# Altium schematic symbol library Ethernet_Modbus_Dev_Board.SCHLIB: 50 symbols
Pins are listed as number, name and electrical type; pins without a type are passive.

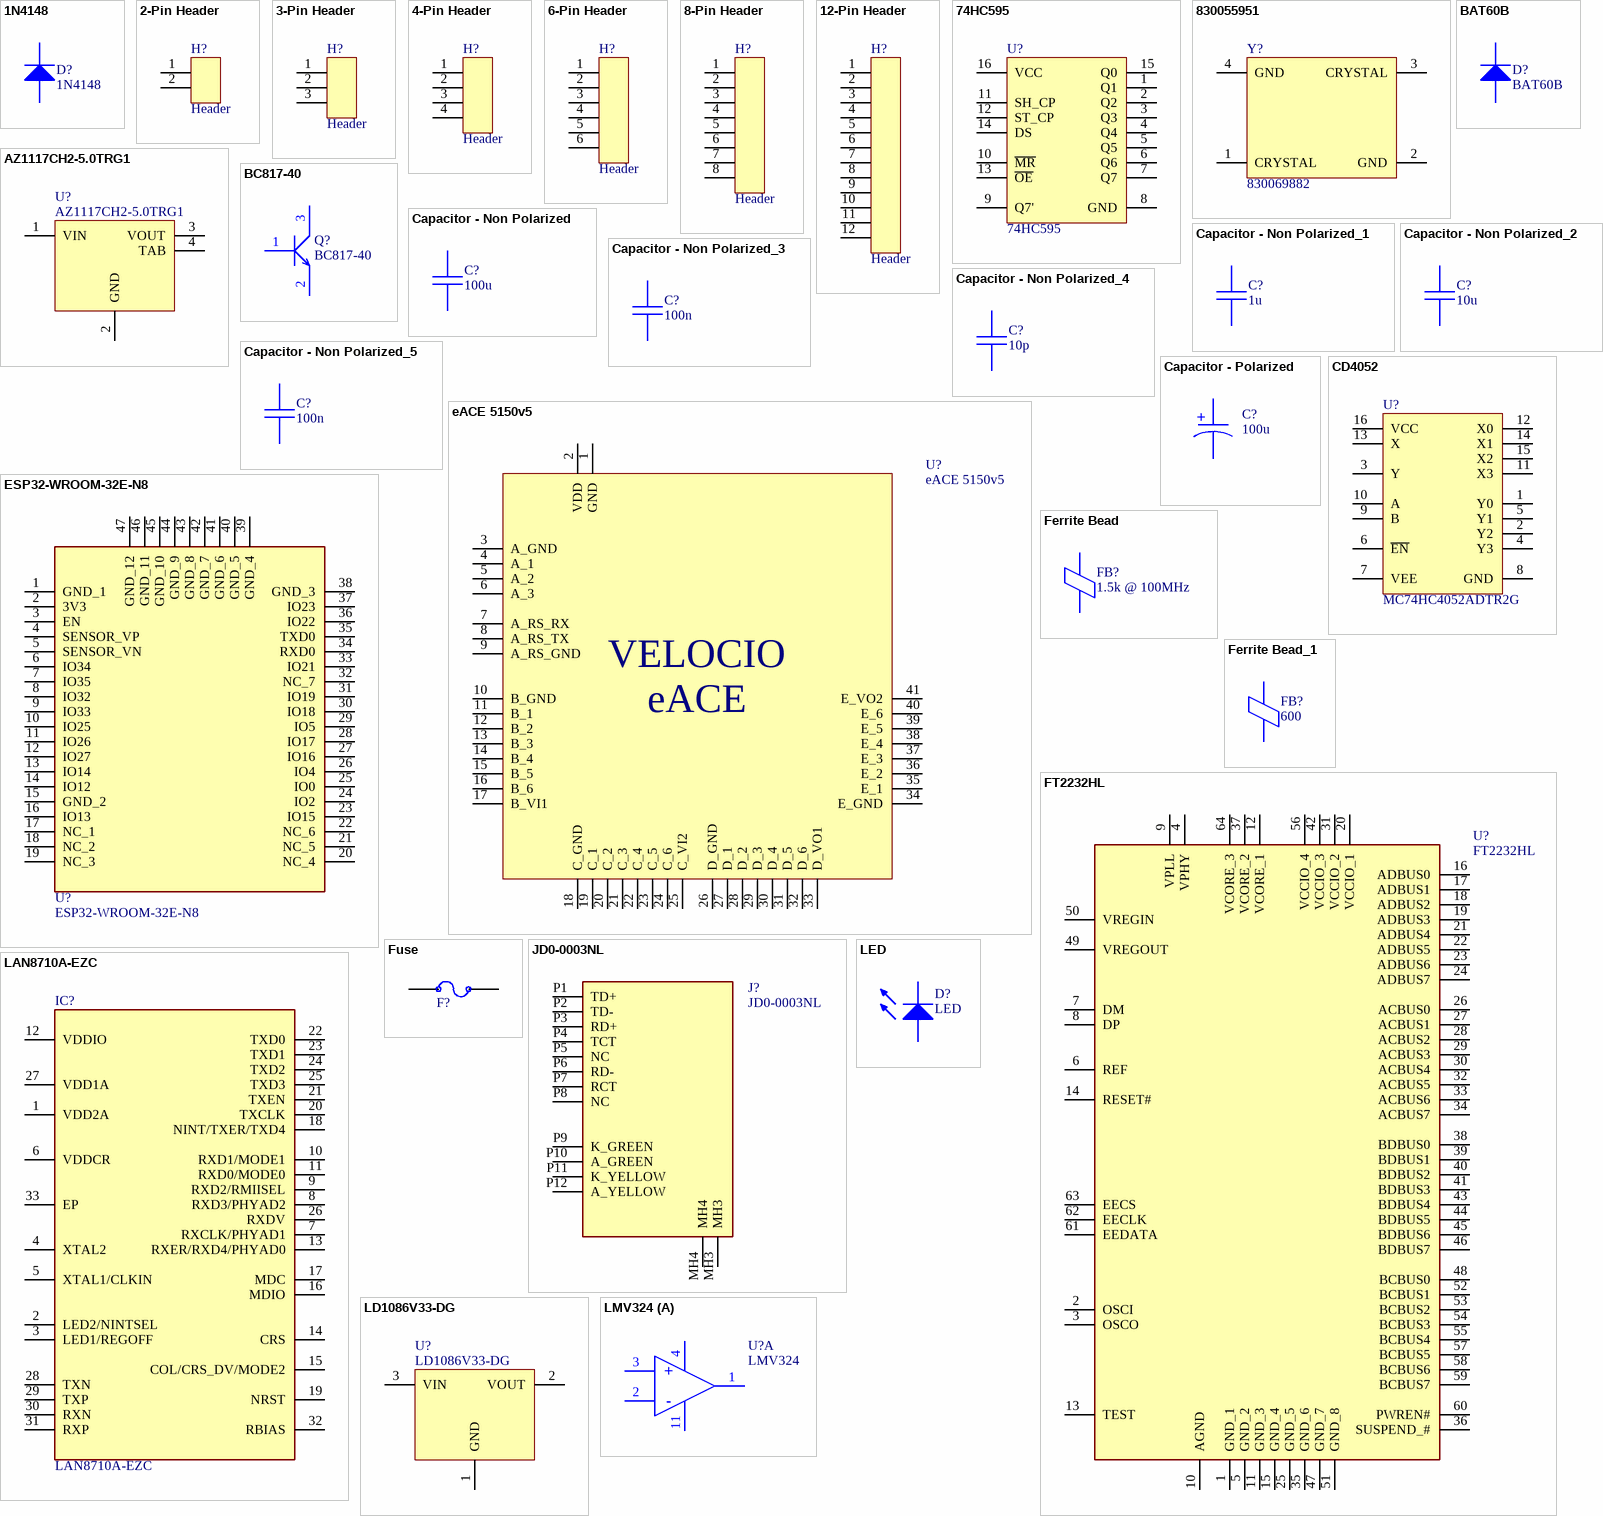
[diagram p0: symbols 1N4148 to LMV324]

## 1N4148
designator D?
1N4148 General Purpose Switching Diode; ComponentLink1Description: Datasheet; ComponentLink1URL: https://www.smc-diodes.com/propdf/1N4148W%20N0571%20REV.E.pdf
footprint SOD123
pins: 1 K, 2 A

## 2-Pin Header
designator H?, comment Header
2-Pin Header
footprint Header_1X2
pins: 1, 2

## 3-Pin Header
designator H?, comment Header
3-Pin Header
footprint Header_1X3
pins: 1, 2, 3

## 4-Pin Header
designator H?, comment Header
4-Pin Header
footprint Header_1X4
pins: 1, 2, 3, 4

## 6-Pin Header
designator H?, comment Header
6-Pin Header
footprint Header_1X6
pins: 1, 2, 3, 4, 5, 6

## 8-Pin Header
designator H?, comment Header
8-Pin Header
footprint Header_1X8
pins: 1, 2, 3, 4, 5, 6, 7, 8

## 12-Pin Header
designator H?, comment Header
12-Pin Header
footprint Header_1X12
pins: 1, 2, 3, 4, 5, 6, 7, 8, 9, 10, 11, 12

## 74HC595
designator U?
Shift Register
footprint TSSOP16
pins: 1 Q1, 2 Q2, 3 Q3, 4 Q4, 5 Q5, 6 Q6, 7 Q7, 8 GND, 9 Q7', 10 ~{MR}, 11 SH_CP, 12 ST_CP, 13 ~{OE}, 14 DS, 15 Q0, 16 VCC

## 830055951
designator Y?, comment 830069882
Crystal or Oscillator; Manufacturer_Name: Wurth Elektronik; Manufacturer_Part_Number: 830055951; Datasheet Link: https://www.mouser.co.uk/datasheet/2/445/830055951-2005581.pdf; Height: 0.8mm; Mouser Part Number: 710-830055951; Mouser Price/Stock: https://www.mouser.co.uk/ProductDetail/Wurth-Elektronik/830055951?qs=2WXlatMagcGarbRbipLZSg%3D%3D
footprint 830055951
pins: 1 CRYSTAL, 2 GND, 3 CRYSTAL, 4 GND

## AZ1117CH2-5.0TRG1
designator U?
5.0V Linear Voltage Regulator
footprint SOT223
pins: 1 VIN, 2 GND, 3 VOUT, 4 TAB

## BAT60B
designator D?
Schottky Diodes & Rectifiers 10 V 3000 mA; ComponentLink1Description: Datasheet; ComponentLink1URL: https://www.smc-diodes.com/propdf/1N4148W%20N0571%20REV.E.pdf
footprint SOD323
pins: 1 K, 2 A

## BC817-40
designator Q?
Transistor BJT NPN; Manufacturer_Name: Nexperia; Manufacturer_Part_Number: BC817-40,215; Datasheet Link: https://assets.nexperia.com/documents/data-sheet/BC817_SER.pdf; Height: 1.1mm; Mouser Part Number: 771-BC817-40-T/R; Mouser Price/Stock: https://www.mouser.co.uk/ProductDetail/Nexperia/BC817-40215?qs=me8TqzrmIYU%252B245p8hOLaQ%3D%3D; Arrow Part Number: BC817-40,215; Arrow Price/Stock: https://www.arrow.com/en/products/bc817-40215/nexperia?region=europe
footprint SOT23
pins: 1 B, 2 E, 3 C

## Capacitor - Non Polarized
designator C?, comment 100u
Non Polarized Capacitor
footprint CAPTH6.3x11
pins: 1, 2

## Capacitor - Non Polarized_1
designator C?, comment 1u
Non Polarized Capacitor
footprint CAP0603
pins: 1, 2

## Capacitor - Non Polarized_2
designator C?, comment 10u
Non Polarized Capacitor
footprint CAP0805 (Chip Capacitor, 2-Leads, Body 2.00x1.20mm, IPC Medium Density)
pins: 1, 2

## Capacitor - Non Polarized_3
designator C?, comment 100n
Non Polarized Capacitor
footprint CAP0603
pins: 1, 2

## Capacitor - Non Polarized_4
designator C?, comment 10p
Non Polarized Capacitor
footprint CAP0402
pins: 1, 2

## Capacitor - Non Polarized_5
designator C?, comment 100n
Non Polarized Capacitor
footprint CAP0603
pins: 1, 2

## Capacitor - Polarized
designator C?, comment 100u
Polarized Capacitor
footprint CAPTH6.3x11
pins: 1, 2
text: +

## CD4052
designator U?, comment MC74HC4052ADTR2G
Dual 4-Channel Analog Multiplexer/Demultiplexer; ComponentLink1Description: Datasheet; ComponentLink1URL: https://www.onsemi.com/pdf/datasheet/mc74hc4051a-d.pdf
footprint TSSOP16
pins: 1 Y0, 2 Y2, 3 Y, 4 Y3, 5 Y1, 6 ~{EN}, 7 VEE, 8 GND, 9 B, 10 A, 11 X3, 12 X0, 13 X, 14 X1, 15 X2, 16 VCC

## eACE 5150v5
designator U?
footprint eACEv5150
pins: 1 GND, 2 VDD, 3 A_GND, 4 A_1, 5 A_2, 6 A_3, 7 A_RS_RX, 8 A_RS_TX, 9 A_RS_GND, 10 B_GND, 11 B_1, 12 B_2, 13 B_3, 14 B_4, 15 B_5, 16 B_6, 17 B_VI1, 18 C_GND, 19 C_1, 20 C_2, 21 C_3, 22 C_4, 23 C_5, 24 C_6, 25 C_VI2, 26 D_GND, 27 D_1, 28 D_2, 29 D_3, 30 D_4, 31 D_5, 32 D_6, 33 D_VO1, 34 E_GND, 35 E_1, 36 E_2, 37 E_3, 38 E_4, 39 E_5, 40 E_6, 41 E_VO2
text: VELOCIO; eACE

## ESP32-WROOM-32E-N8
designator U?
Integrated Circuit; Manufacturer_Name: Espressif Systems; Datasheet Link: https://www.google.com/url?sa=t&rct=j&q=&esrc=s&source=web&cd=&ved=2ahUKEwjLw4ysybv2AhXFzIUKHZUbB64QFnoECCwQAQ&url=https%3A%2F%2Fwww.espressif.com%2Fsites%2Fdefault%2Ffiles%2Fdocumentation%2Fesp32-wroom-32e_esp32-wroom-32ue_datasheet_en.pdf&usg=AOvVaw1xSL; Height: 3.25mm; Manufacturer_Part_Number: ESP32-WROOM-32E-N8; Mouser Part Number: 356-ESP32WRM32E164PH; Mouser Price/Stock: https://www.mouser.co.uk/ProductDetail/Espressif-Systems/ESP32-WROOM-32E-N8?qs=Li%252BoUPsLEnsLnZW%252BGLgUhw%3D%3D
footprint ESP32WROOM32EN8
pins: 1 GND_1, 2 3V3, 3 EN, 4 SENSOR_VP, 5 SENSOR_VN, 6 IO34, 7 IO35, 8 IO32, 9 IO33, 10 IO25, 11 IO26, 12 IO27, 13 IO14, 14 IO12, 15 GND_2, 16 IO13, 17 NC_1, 18 NC_2, 19 NC_3, 20 NC_4, 21 NC_5, 22 NC_6, 23 IO15, 24 IO2, 25 IO0, 26 IO4, 27 IO16, 28 IO17, 29 IO5, 30 IO18, 31 IO19, 32 NC_7, 33 IO21, 34 RXD0, 35 TXD0, 36 IO22, 37 IO23, 38 GND_3, 39 GND_4, 40 GND_5, 41 GND_6, 42 GND_7, 43 GND_8, 44 GND_9, 45 GND_10, 46 GND_11, 47 GND_12

## Ferrite Bead
designator FB?, comment 1.5k @ 100MHz
Ferrite Bead
footprint BEADC0603
pins: 1, 2

## Ferrite Bead_1
designator FB?, comment 600
Ferrite Bead
footprint BEADC0805
pins: 1, 2

## FT2232HL
designator U?
USB to UART Interface; Manufacturer_Name: FTDI Chip; Height: 1.6mm; Manufacturer_Part_Number: FT2232HL
footprint QFP50P1200X1200X160-64N
pins: 1 GND_1, 2 OSCI, 3 OSCO, 4 VPHY, 5 GND_2, 6 REF, 7 DM, 8 DP, 9 VPLL, 10 AGND, 11 GND_3, 12 VCORE_1, 13 TEST, 14 RESET#, 15 GND_4, 16 ADBUS0, 17 ADBUS1, 18 ADBUS2, 19 ADBUS3, 20 VCCIO_1, 21 ADBUS4, 22 ADBUS5, 23 ADBUS6, 24 ADBUS7, 25 GND_5, 26 ACBUS0, 27 ACBUS1, 28 ACBUS2, 29 ACBUS3, 30 ACBUS4, 31 VCCIO_2, 32 ACBUS5, 33 ACBUS6, 34 ACBUS7, 35 GND_6, 36 SUSPEND_#, 37 VCORE_2, 38 BDBUS0, 39 BDBUS1, 40 BDBUS2, 41 BDBUS3, 42 VCCIO_3, 43 BDBUS4, 44 BDBUS5, 45 BDBUS6, 46 BDBUS7, 47 GND_7, 48 BCBUS0, 49 VREGOUT, 50 VREGIN, 51 GND_8, 52 BCBUS1, 53 BCBUS2, 54 BCBUS3, 55 BCBUS4, 56 VCCIO_4, 57 BCBUS5, 58 BCBUS6, 59 BCBUS7, 60 PWREN#, 61 EEDATA, 62 EECLK, 63 EECS, 64 VCORE_3

## Fuse
designator F?  (value not drawn)
footprint Fuse Holder 5x20mm (5x20mm Glass Fuse Holder)
footprint FUSE 1812
pins: 1, 2

## JD0-0003NL
designator J?
Connector; Manufacturer_Name: Pulse Electronics; Datasheet Link: https://productfinder.pulseeng.com/doc_type/WEB301/doc_num/JD0-0003NL-01/doc_part/JD0-0003NL.pdf; Height: 13.75mm; Manufacturer_Part_Number: JD0-0003NL; Mouser Part Number: 673-JD0-0003NL; Mouser Price/Stock: https://www.mouser.co.uk/ProductDetail/Pulse-Electronics/JD0-0003NL?qs=oF%2FSscNnLpAUcucPF%2Fyt0A%3D%3D; Arrow Part Number: JD0-0003NL; Arrow Price/Stock: https://www.arrow.com/en/products/jd0-0003nl/pulse-electronics-corporation
footprint JD00003NL
pins: MH3, MH4, P1 TD+, P2 TD-, P3 RD+, P4 TCT, P5 NC, P6 RD-, P7 RCT, P8 NC, P9 K_GREEN, P10 A_GREEN, P11 K_YELLOW, P12 A_YELLOW

## LAN8710A-EZC
designator IC?
Integrated Circuit; Manufacturer_Name: Microchip; Datasheet Link: https://componentsearchengine.com/Datasheets/2/LAN8710A-EZC.pdf; Height: 1mm; Manufacturer_Part_Number: LAN8710A-EZC; Mouser Part Number: 886-LAN8710A-EZC; Mouser Price/Stock: https://www.mouser.co.uk/ProductDetail/Microchip-Technology/LAN8710A-EZC?qs=pA5MXup5wxHaP4DDCLm2Jg%3D%3D; Arrow Part Number: LAN8710A-EZC; Arrow Price/Stock: https://www.arrow.com/en/products/lan8710a-ezc/microchip-technology?utm_currency=USD&region=nac
footprint QFN50P500X500X100-33N-D
pins: 1 VDD2A, 2 LED2/NINTSEL, 3 LED1/REGOFF, 4 XTAL2, 5 XTAL1/CLKIN, 6 VDDCR, 7 RXCLK/PHYAD1, 8 RXD3/PHYAD2, 9 RXD2/RMIISEL, 10 RXD1/MODE1, 11 RXD0/MODE0, 12 VDDIO, 13 RXER/RXD4/PHYAD0, 14 CRS, 15 COL/CRS_DV/MODE2, 16 MDIO, 17 MDC, 18 NINT/TXER/TXD4, 19 NRST, 20 TXCLK, 21 TXEN, 22 TXD0, 23 TXD1, 24 TXD2, 25 TXD3, 26 RXDV, 27 VDD1A, 28 TXN, 29 TXP, 30 RXN, 31 RXP, 32 RBIAS, 33 EP

## LD1086V33-DG
designator U?
Power Supply; Manufacturer_Name: STMicroelectronics; Datasheet Link: https://componentsearchengine.com/Datasheets/1/LD1086V33-DG.pdf; Height: 4.6mm; Manufacturer_Part_Number: LD1086V33-DG; Mouser Part Number: 511-LD1086V33-DG; Mouser Price/Stock: https://www.mouser.co.uk/ProductDetail/STMicroelectronics/LD1086V33-DG?qs=kWQV1gtkNncEt67PbJzViw%3D%3D; Arrow Part Number: LD1086V33-DG; Arrow Price/Stock: https://www.arrow.com/en/products/ld1086v33-dg/stmicroelectronics?region=europe
footprint TO-220-3
pins: 1 GND, 2 VOUT, 3 VIN

## LED
designator D?
General Purpose LED; ComponentLink1Description: Datasheet; ComponentLink1URL: https://www.smc-diodes.com/propdf/1N4148W%20N0571%20REV.E.pdf
footprint SMDLED2012X06N (Chip LED, 2-Leads, Body 2.00x1.20mm)
footprint LEDM2012X80N
pins: 1 K, 2 A

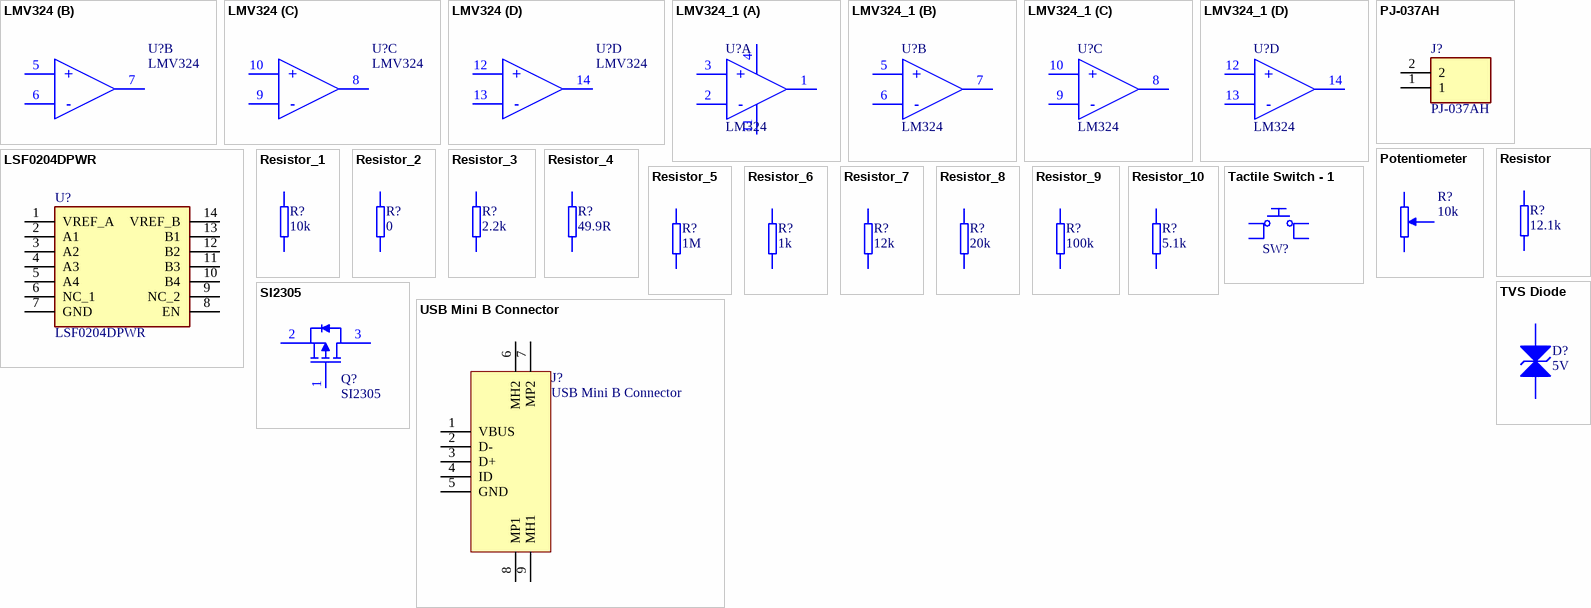
[diagram p1: symbols LMV324 to USB Mini B Connector]

## LMV324
designator U?
Quad General Purpose Op Amp; ComponentLink1Description: Datasheet; ComponentLink1URL: https://www.ti.com/lit/ds/symlink/lm224.pdf?
footprint SOIC14
part A pins: 1 OUT A, 2 -IN A, 3 +IN A, 4 V+, 11 V-
part B pins: 5 +IN B, 6 -IN B, 7 OUT B
part C pins: 8 OUT C, 9 -IN C, 10 +IN C
part D pins: 12 +IN D, 13 -IN D, 14 OUT D
part A text: +; -
part B text: +; -
part C text: +; -
part D text: +; -

## LMV324_1
designator U?, comment LM324
Quad General Purpose Op Amp; ComponentLink1Description: Datasheet; ComponentLink1URL: https://www.ti.com/lit/ds/symlink/lm224.pdf?
footprint SOIC14
part A pins: 1 OUT A, 2 -IN A, 3 +IN A, 4 V+, 11 V-
part B pins: 5 +IN B, 6 -IN B, 7 OUT B
part C pins: 8 OUT C, 9 -IN C, 10 +IN C
part D pins: 12 +IN D, 13 -IN D, 14 OUT D
part A text: +; -
part B text: +; -
part C text: +; -
part D text: +; -

## LSF0204DPWR
designator U?
Integrated Circuit; Manufacturer_Name: Texas Instruments; Datasheet Link: http://www.ti.com/lit/gpn/lsf0204d; Height: 1.2mm; Manufacturer_Part_Number: LSF0204DPWR; Mouser Part Number: 595-LSF0204DPWR; Mouser Price/Stock: https://www.mouser.co.uk/ProductDetail/Texas-Instruments/LSF0204DPWR?qs=ADSrZYdIRCcP9%252B%2FUL5YMBQ%3D%3D; Arrow Part Number: LSF0204DPWR; Arrow Price/Stock: https://www.arrow.com/en/products/lsf0204dpwr/texas-instruments?region=nac
footprint TSSOP14
pins: 1 VREF_A, 2 A1, 3 A2, 4 A3, 5 A4, 6 NC_1, 7 GND, 8 EN, 9 NC_2, 10 B4, 11 B3, 12 B2, 13 B1, 14 VREF_B

## PJ-037AH
designator J?
Connector; Manufacturer_Name: Same Sky; Datasheet Link: https://www.arrow.com/en/products/pj-037ah/cui-devices; Height: 11.2mm; Manufacturer_Part_Number: PJ-037AH; Mouser Part Number: 490-PJ-037AH; Mouser Price/Stock: https://www.mouser.co.uk/ProductDetail/CUI-Devices/PJ-037AH?qs=WyjlAZoYn50M7m1AkzfPaQ%3D%3D; Arrow Part Number: PJ-037AH; Arrow Price/Stock: https://www.arrow.com/en/products/pj-037ah/cui-devices?region=nac
footprint PJ037AH
pins: 1, 2

## Potentiometer
designator R?, comment 10k
Potentionmeter
footprint 3339P1103LF
pins: 1, 2, 3

## Resistor
designator R?, comment 12.1k
Resistor
footprint RESC0603
pins: 1, 2

## Resistor_1
designator R?, comment 10k
Resistor
footprint RESC0603
pins: 1, 2

## Resistor_2
designator R?, comment 0
Resistor
footprint RESC0402
pins: 1, 2

## Resistor_3
designator R?, comment 2.2k
Resistor
footprint RESC0603
pins: 1, 2

## Resistor_4
designator R?, comment 49.9R
Resistor
footprint RESC0603
pins: 1, 2

## Resistor_5
designator R?, comment 1M
Resistor
footprint RESC0402
pins: 1, 2

## Resistor_6
designator R?, comment 1k
Resistor
footprint RESC0603
pins: 1, 2

## Resistor_7
designator R?, comment 12k
Resistor
footprint RESC0603
pins: 1, 2

## Resistor_8
designator R?, comment 20k
Resistor
footprint RESC0603
pins: 1, 2

## Resistor_9
designator R?, comment 100k
Resistor
footprint RESC0603
pins: 1, 2

## Resistor_10
designator R?, comment 5.1k
Resistor
footprint RESC0603
pins: 1, 2

## SI2305
designator Q?
General Purpose P-Channel MOSFET; ComponentLink1Description: Datasheet; ComponentLink1URL: https://www.vishay.com/docs/64847/si2305cd.pdf
footprint SOT23
pins: 1 G, 2 S, 3 D

## Tactile Switch - 1
designator SW?  (value not drawn)
Tactile Pushbutton - Contact Pad
footprint Tactile Button 4.2mm x 3.2mm
pins: 1, 2, 3, 4

## TVS Diode
designator D?, comment 5V
TVS Diode
footprint SOD323
pins: 1 A, 2 K

## USB Mini B Connector
designator J?
footprint USB Mini-B
pins: 1 VBUS, 2 D-, 3 D+, 4 ID, 5 GND, 6 MH2, 7 MP2, 8 MP1, 9 MH1